# Altium schematic symbol library Connector.SchLib: 208 symbols (part 1 of 4)
Pins are listed as number, name and electrical type; pins without a type are passive.

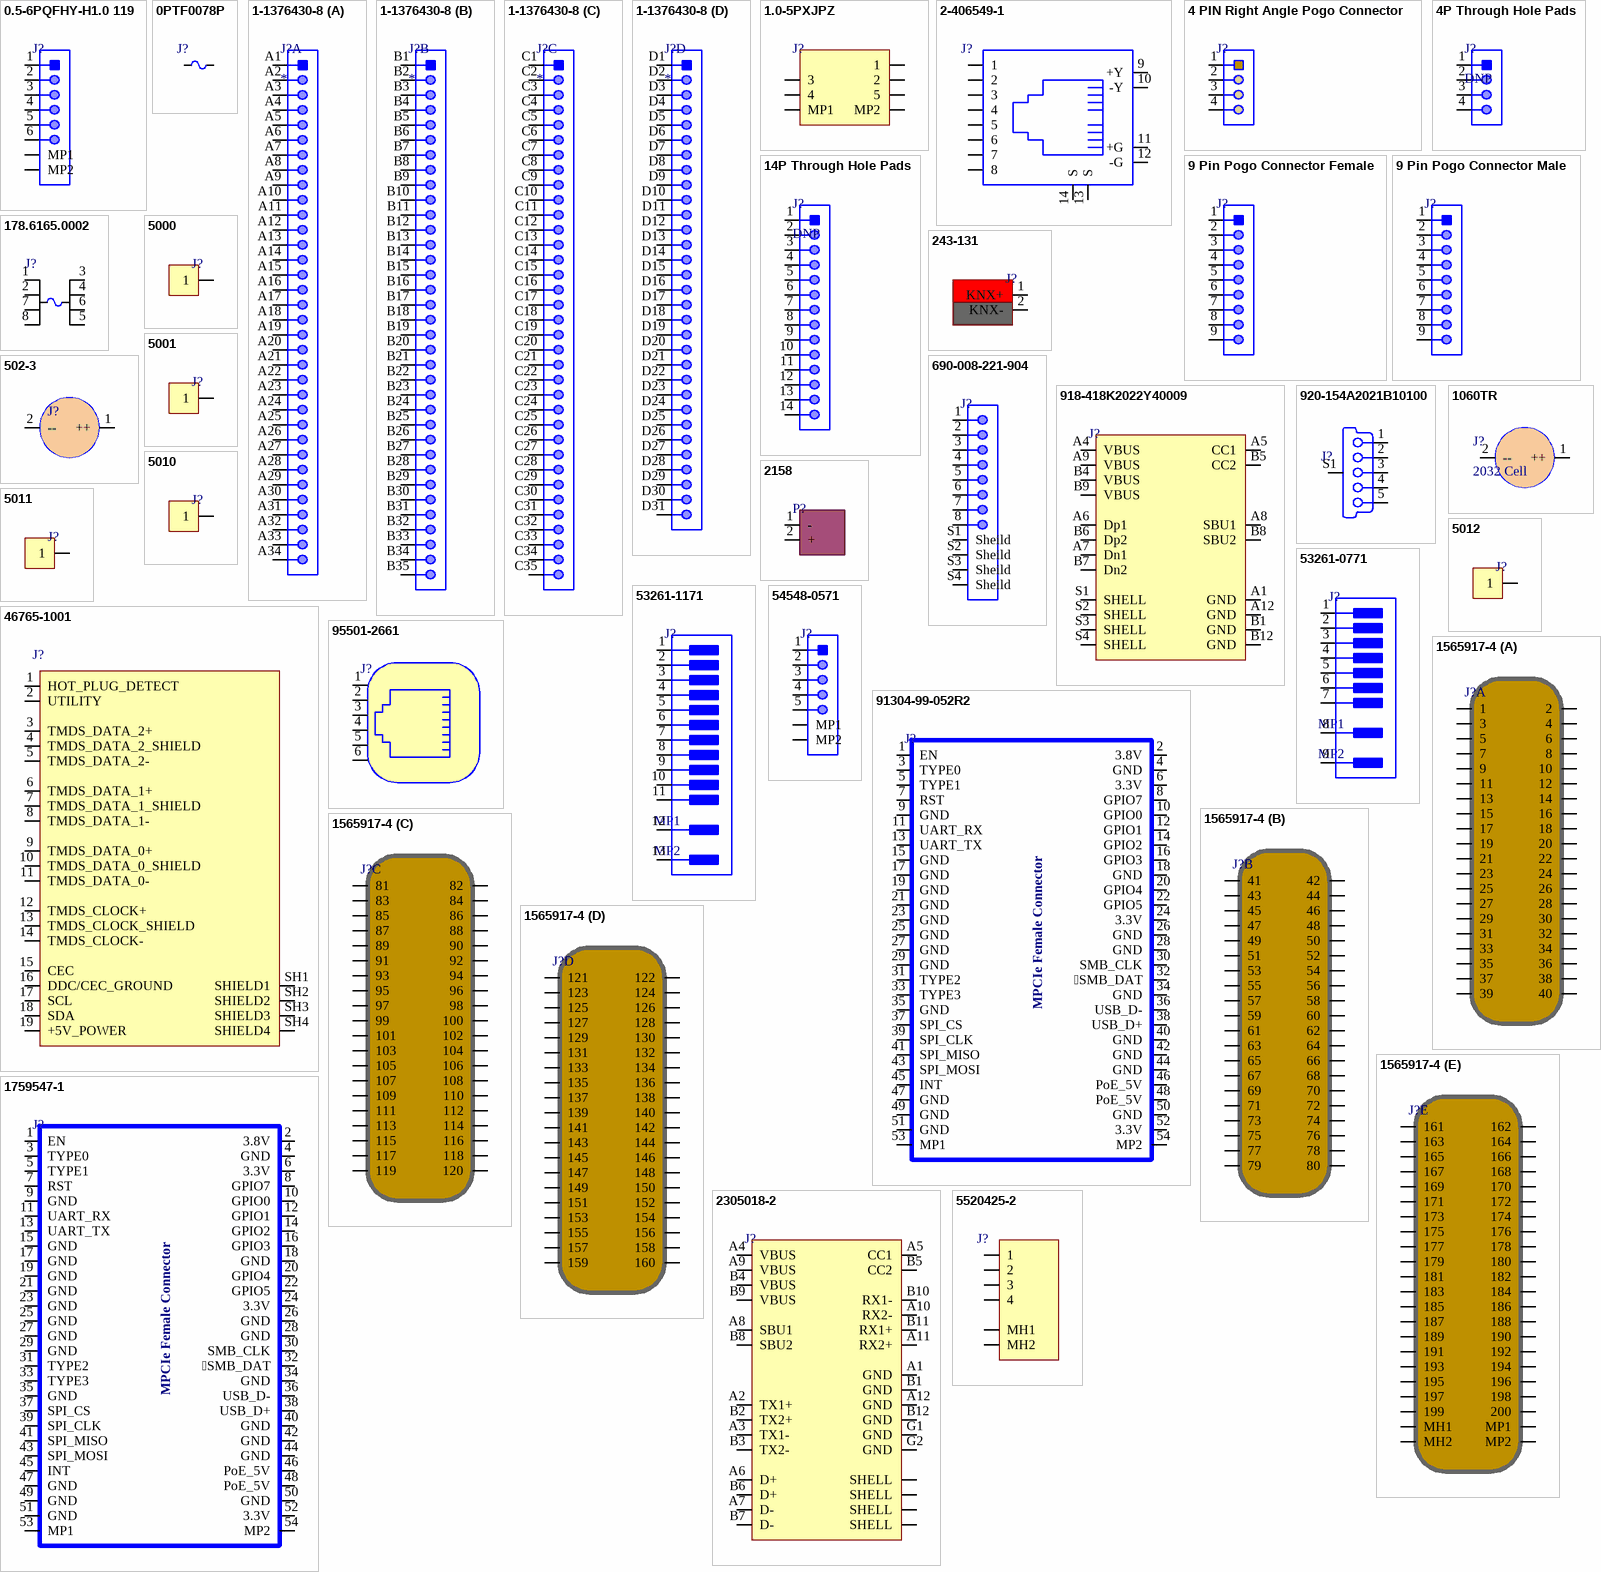
[diagram p0: symbols 0.5-6PQFHY-H1.0 119 to 5520425-2]

## 0.5-6PQFHY-H1.0 119
designator J?
Slide Lock -25℃~+85℃ 6 Double-sided contacts/up and down connection Surface Mount 0.5mm SMD,P=0.5mm FFC/FPC Connectors ROHS; Manufacturer: SHOU HAN; Manufacturer Part Number: 0.5-6PQFHY-H1.0 119; Package: SMD,P=0.5mm; LCSC Part Number: C2858296; Item Type: Connector; ComponentLink1Description: LCSC; ComponentLink1URL: https://www.lcsc.com/product-detail/FFC-span-style-background-color-ff0-FPC-span-Connectors_SHOU-HAN-0-5-6PQFHY-H1-0-119_C2858296.html
footprint 0.5-6PQFHY-H1.0 119
pins: 1, 2, 3, 4, 5, 6, MP1, MP2

## 0PTF0078P
designator J?
Fuse Holder 6.3A 250VDC/250VAC Through Hole Pin; Manufacturer: Littelfuse; Manufacturer Part Number: 0PTF0078P; Supplier: Future Electronics; Supplier Part Number: 9114913; RoHS: Yes; Category: Fuse Holders; Stock: 4000; Pricing: 2000=0.118, 6000=0.114, 10000=0.113, 20000=0.111, 40000=0.107 (USD); ComponentLink1URL: https://datasheet.ciiva.com/18456/ptf075-77-78-18456970.pdf?src-supplier=Digi-Key; ComponentLink1Description: https://datasheet.ciiva.com/18456/ptf075-77-78-18456970.pdf?src-supplier=Digi-Key; LCSC Part Number: C2760101; Item Type: Fuse Holder
footprint 0PTF0078P
pins: 1, 2

## 1-1376430-8
designator J?
025/040 135POS CAP ASSY H TIN; Manufacturer: TE Connectivity Raychem; Manufacturer Part Number: 1-1376430-8; Item Type: Connector; Supplier 1: Digikey; RoHS: Yes; Category: Connectors; Stock 1: 1632; Pricing 1: 1=11.55, 12=10.02667 (USD); Supplier Part Number 1: 17-1-1376430-8-ND
footprint 1-1376430-8
part A pins: A1, A2, A3, A4, A5, A6, A7, A8, A9, A10, A11, A12, A13, A14, A15, A16, A17, A18, A19, A20, A21, A22, A23, A24, A25, A26, A27, A28, A29, A30, A31, A32, A33, A34
part B pins: B1, B2, B3, B4, B5, B6, B7, B8, B9, B10, B11, B12, B13, B14, B15, B16, B17, B18, B19, B20, B21, B22, B23, B24, B25, B26, B27, B28, B29, B30, B31, B32, B33, B34, B35
part C pins: C1, C2, C3, C4, C5, C6, C7, C8, C9, C10, C11, C12, C13, C14, C15, C16, C17, C18, C19, C20, C21, C22, C23, C24, C25, C26, C27, C28, C29, C30, C31, C32, C33, C34, C35
part D pins: D1, D2, D3, D4, D5, D6, D7, D8, D9, D10, D11, D12, D13, D14, D15, D16, D17, D18, D19, D20, D21, D22, D23, D24, D25, D26, D27, D28, D29, D30, D31

## 1.0-5PXJPZ
designator J?
Slide Lock -25℃~+85℃ 5P Bottom Contact Surface Mount，Right Angle 1mm SMD,P=1mm,Surface Mount，Right Angle FFC/FPC Connectors ROHS; Manufacturer: BOOMELE(Boom Precision Elec); Manufacturer Part Number: 1.0-5PXJPZ; Package: SMD,P=1mm; LCSC Part Number: C31031; Item Type: FPC Connector; ComponentLink1Description: LCSC; ComponentLink1URL: https://www.lcsc.com/product-detail/FFC-FPC-Connectors_BOOMELE-Boom-Precision-Elec-1-0-5PXJPZ_C31031.html
footprint 1.0-5PXJPZ_
pins: 1, 2, 3, 4, 5, MP1, MP2

## 2-406549-1
designator J?
CONN MOD JACK 8P8C R/A SHIELDED; Manufacturer: TE Connectivity; Manufacturer Part Number: 2-406549-1; Item Type: Ethernet Connectors; Supplier: Future Electronics; LCSC Part Number: C125068; RoHS: Yes; Stock: 6608; Pricing: 1=2.16, 30=2.1, 100=2.04, 200=2, 500=1.9 (USD)
footprint 2-406549-1
pins: 1, 2, 3, 4, 5, 6, 7, 8, 9 +Y, 10 -Y, 11 +G, 12 -G, 13 S, 14 S

## 4 PIN Right Angle Pogo Connector
designator J?
4pin spring loaded right angle bended pogo pin connectorPopular; Manufacturer Part Number: 4 PIN Right Angle Pogo Connector; Item Type: Pogo Conector; Package: Custom; LCSC Part Number: *
footprint 4 PIN Right Angle Pogo Connector
pins: 1, 2, 3, 4

## 4P Through Hole Pads
designator J?, comment DNP
Wire Connecting Pads; Manufacturer Part Number: 4P Through Hole Pads; Item Type: Through Hole Pads
footprint 4P Through Hole Pads
pins: 1, 2, 3, 4

## 9 Pin Pogo Connector Female
designator J?
3A Magnetic Pogo Pin Connector 9 pin; Manufacturer: RTLECS; Manufacturer Part Number: MG0922F-RA; Package: Custom; ComponentLink1Description: ALiexpress; ComponentLink1URL: https://vi.aliexpress.com/item/1005002669709542.html
footprint MG0922F-RA
pins: 1, 2, 3, 4, 5, 6, 7, 8, 9

## 9 Pin Pogo Connector Male
designator J?
3A Magnetic Pogo Pin Connector 9 pin; Manufacturer: RTLECS; Manufacturer Part Number: MG0922M-RA; Package: Custom; ComponentLink1Description: ALiexpress; ComponentLink1URL: https://vi.aliexpress.com/item/1005002669709542.html
footprint MG0922M-RA
pins: 1, 2, 3, 4, 5, 6, 7, 8, 9

## 14P Through Hole Pads
designator J?, comment DNP
Wire Connecting Pads; Manufacturer Part Number: 14P Through Hole Pads; Item Type: Through Hole Pads
footprint 14P Through Hole Pads_
pins: 1, 2, 3, 4, 5, 6, 7, 8, 9, 10, 11, 12, 13, 14

## 178.6165.0002
designator J?
FUSE HOLDER BLADE 80V PCB; Manufacturer: Littelfuse Wickmann; Manufacturer Part Number: 178.6165.0002; Body Material: 4896ConductorMaterial; Current Rating: 30A; Supplier: Future Electronics; Supplier Part Number: 9883406; RoHS: Yes; Category: Fuse Holders; Stock: 3811; Pricing: 1=2.02, 40=1.96, 125=1.91, 400=1.86, 1250=1.77 (USD); Material: 4896ConductorMaterial; Width: 17.5mm; Thickness: 6mm; Lead Free: 5697LeadFree; ComponentLink1URL: https://datasheet.ciiva.com/295/littelfuse-ato-pcb-fuse-holders-178-6765-295568.pdf?src-supplier=Digikey; ComponentLink1Description: https://datasheet.ciiva.com/295/littelfuse-ato-pcb-fuse-holders-178-6765-295568.pdf?src-supplier=Digikey; ComponentLink2URL: https://datasheet.ciiva.com/4480/flrholder-58019-4480354.pdf?src-supplier=Mouser; ComponentLink2Description: https://datasheet.ciiva.com/4480/flrholder-58019-4480354.pdf?src-supplier=Mouser; ComponentLink3URL: https://datasheet.ciiva.com/16372/flrholder-16372408.pdf?src-supplier=Future+Electronics; ComponentLink3Description: https://datasheet.ciiva.com/16372/flrholder-16372408.pdf?src-supplier=Future+Electronics; ComponentLink4URL: https://datasheet.ciiva.com/15187/getdatasheetpartid-31610-15187861.pdf?src-supplier=Verical; ComponentLink4Description: https://datasheet.ciiva.com/15187/getdatasheetpartid-31610-15187861.pdf?src-supplier=Verical; LCSC Part Number: C207061; Item Type: Fuse Holder
footprint 178.6165.0002
pins: 1, 2, 3, 4, 5, 6, 7, 8

## 243-131
designator J?
THT PIN, SILVER-COLORED; Manufacturer: WAGO; Manufacturer Part Number: 243-131; Supplier: Digi-Key; Supplier Part Number: 2946-243-131-ND; RoHS: Yes; Category: Connectors; Pricing: 1000=0.04963 (USD); ComponentLink1URL: https://datasheet.ciiva.com/29213/729762-da-01-en-loetstift-243-131-1000-st-29213727.pdf?src-supplier=Conrad; ComponentLink1Description: https://datasheet.ciiva.com/29213/729762-da-01-en-loetstift-243-131-1000-st-29213727.pdf?src-supplier=Conrad
footprint 243-131
pins: 1 KNX+, 2 KNX-

## 502-3
designator J?
BATT HLDR COIN 16MM 1 CEL PC PIN; Manufacturer: Keystone Electronics; Manufacturer Part Number: 502-3; Item Type: Batteries and Accessories; Supplier: Digikey; Supplier Part Number: 36-5023-ND; RoHS: Yes; Stock: 31665; Pricing: 1=2.18, 25=1.8356, 100=1.5203, 250=1.39836, 500=1.3123, 1000=1.22624, 2500=1.1115, 5000=1.01828 (USD); ComponentLink1URL: https://datasheet.ciiva.com/4/502-3-4683.pdf?src-supplier=Digikey; ComponentLink1Description: https://datasheet.ciiva.com/4/502-3-4683.pdf?src-supplier=Digikey; ComponentLink2URL: https://datasheet.ciiva.com/16375/m60-2p2-16375499.pdf?src-supplier=Future+Electronics; ComponentLink2Description: https://datasheet.ciiva.com/16375/m60-2p2-16375499.pdf?src-supplier=Future+Electronics; LCSC Part Number: C238132
footprint 502-3
pins: 1 ++, 2 --

## 690-008-221-904
designator J?
Socket; USB A; THT; angled 90°; double; USB 2.0; gold-plated; Manufacturer Part Number: 690-008-221-904; Manufacturer: EDAC; Item Type: USB A Conncetor; ComponentLink1Description: Digikey; ComponentLink1URL: https://www.digikey.com/en/products/detail/edac-inc/690-008-221-013/1299805
footprint 690-008-221-904_
pins: 1, 2, 3, 4, 5, 6, 7, 8, S1 Sheild, S2 Sheild, S3 Sheild, S4 Sheild

## 918-418K2022Y40009
designator J?
USB 3.1 1 Brick nogging 16 Female Type-C SMD USB Connectors ROHS; Manufacturer: Jing Extension; Manufacturer Part Number: 918-418K2022Y40009; Item Type: USB C Connector; Package: Custom; LCSC Part Number: C2763102; ComponentLink1Description: LCSC; ComponentLink1URL: https://www.lcsc.com/product-detail/USB-Connectors_Jing-Extension-of-the-Electronic-Co-918-418K2022Y40009_C2763102.html
footprint 918-418K2022Y40009
pins: A1 GND (power), A4 VBUS (power), A5 CC1, A6 Dp1, A7 Dn1, A8 SBU1, A9 VBUS (power), A12 GND (power), B1 GND (power), B4 VBUS (power), B5 CC2, B6 Dp2, B7 Dn2, B8 SBU2, B9 VBUS (power), B12 GND (power), S1 SHELL, S2 SHELL, S3 SHELL, S4 SHELL

## 920-154A2021B10100
designator J?
1A USB 2.0 1 Board Edge, Straddle Mount 5P Female -30℃~+80℃ Micro-B - USB Connectors ROHS; Manufacturer: Jing Extension of the Electronic Co.; Manufacturer Part Number: 920-154A2021B10100; Item Type: Micro-B Connector; Package: Custom; LCSC Part Number: C69072; ComponentLink1Description: LCSC; ComponentLink1URL: https://www.lcsc.com/product-detail/USB-Connectors_Jing-Extension-of-the-Electronic-Co-920-154A2021B10100_C69072.html
footprint 920-154A2021B10100
pins: 1 V BUS (5V) "USB Vcc [Red]", 2 D- "USB Data - [White]", 3 D+ "USB Data + [Green]", 4 ID "Not Connected (or joined to pin 5 via resistor)", 5 GND "Ground [Black]", S1 Shield "Shell"

## 1060TR
designator J?, comment 2032 Cell
BATTERY HOLDER COIN 20MM SMD; Manufacturer: Keystone Electronics; Manufacturer Part Number: 1060; Body Material: Glass,Liquid Crystal Polymer; Number of Contacts: 2; Number of Batteries: 1; Approvals: UL; Item Type: Coin Cell Holder; ComponentLink1URL: https://www.distrelec.biz/Web/Downloads/02/32/06950232.pdf?mime=application%2Fpdf&src-supplier=Distrelec; ComponentLink1Description: https://www.distrelec.biz/Web/Downloads/02/32/06950232.pdf?mime=application%2Fpdf&src-supplier=Distrelec; ComponentLink2URL: http://www.farnell.com/datasheets/1769533.pdf?src-supplier=Element14; ComponentLink2Description: http://www.farnell.com/datasheets/1769533.pdf?src-supplier=Element14; ComponentLink3URL: http://www.keyelco.com/product-pdf.cfm?p=726&src-supplier=Digi-Key; ComponentLink3Description: http://www.keyelco.com/product-pdf.cfm?p=726&src-supplier=Digi-Key; ComponentLink4URL: http://www.mouser.com/ds/2/215/060-745916.pdf?src-supplier=Mouser; ComponentLink4Description: http://www.mouser.com/ds/2/215/060-745916.pdf?src-supplier=Mouser; ComponentLink5URL: http://www.rapidonline.com/pdf/18-3627.pdf?src-supplier=Rapid+Electronics; ComponentLink5Description: http://www.rapidonline.com/pdf/18-3627.pdf?src-supplier=Rapid+Electronics; ComponentLink6URL: http://uk.rs-online.com/webdocs/1152/0900766b811529cb.pdf?src-supplier=RSComponents; ComponentLink6Description: http://uk.rs-online.com/webdocs/1152/0900766b811529cb.pdf?src-supplier=RSComponents; ComponentLink7URL: http://www.keyelco.com/userAssets/file/M60-2p4.pdf?src-supplier=Future+Electronics; ComponentLink7Description: http://www.keyelco.com/userAssets/file/M60-2p4.pdf?src-supplier=Future+Electronics; Supplier 1: Digi-Key; Stock 1: 11504; Pricing 1: 1=1.53, 25=1.4208, 100=1.08, 250=0.95352, 500=0.88136, 1000=0.82388, 2500=0.74724, 5000=0.68976 (USD); Mount: Surface Mount,PCB; Color: White; Contact Material: Bronze,Gold; Material: Bronze; Min Operating Temperature: -50°C; Max Operating Temperature: 145°C; Packaging: Tray; Package Quantity: 1; Termination: SMD/SMT; Number of Cells: 1; Diameter: 20mm; Lead Free: Lead Free; REACH SVHC: No SVHC; Supplier Part Number 1: 36-1060-ND; LCSC Part Number: C238069
footprint 1060TR_
pins: 1 ++, 2 --

## 2158
designator P?
XT60 Connector Male-Female Pair, Black (Pololu); Manufacturer: Polulo; Manufacturer Part Number: 2158; Item Type: Power Connector; Package: Custom
footprint 2158.
pins: 1 -, 2 +

## 5000
designator J?
PC TEST POINT MINIATURE RED; Manufacturer: Keystone Electronics; Manufacturer Part Number: 5000; Item Type: Connector; Plating: Silver; Body Material: Bronze,PBT; Insulation: Insulated; Outside Diameter: 2.54mm; Inside Diameter: 1.27mm; Hole Diameter: 1.6mm; Supplier: Digikey; LCSC Part Number: C5199900; RoHS: Yes; Stock: 24415; Pricing: 1=0.38, 25=0.308, 100=0.3015, 250=0.28304, 500=0.2523, 1000=0.17746, 2500=0.16225, 5000=0.15211 (USD); Mounting Technology: PCB,Through Hole; Color: Red; Material: Nylon,Bronze,Silver; Contact Material: Bronze; Contact Plating: Tin,Silver; Series: THM; Packaging: Bulk; Package Quantity: 100; Length: 7.62mm; Height: 0.3inch; RoHS Compliant: Yes; Reach SVHC Compliant: No; Lead Free: Lead Free; Flammability Rating: UL94 V-0; ComponentLink1URL: https://datasheet.ciiva.com/11836/0900766b8009b7c7-11836046.pdf?src-supplier=Rs; ComponentLink1Description: https://datasheet.ciiva.com/11836/0900766b8009b7c7-11836046.pdf?src-supplier=Rs; ComponentLink2URL: https://datasheet.ciiva.com/16883/70182825-16883965.pdf?src-supplier=Allied+Electronics; ComponentLink2Description: https://datasheet.ciiva.com/16883/70182825-16883965.pdf?src-supplier=Allied+Electronics; ComponentLink3URL: https://datasheet.ciiva.com/2917/5000-5004-2917627.pdf?src-supplier=Digikey; ComponentLink3Description: https://datasheet.ciiva.com/2917/5000-5004-2917627.pdf?src-supplier=Digikey
footprint 5000
pins: 1

## 5001
designator J?
PC TEST POINT MINIATURE BLACK; Manufacturer: Keystone Electronics; Manufacturer Part Number: 5001; Item Type: Connector; Plating: Silver; Body Material: Bronze; Number of Ports: 1; Insulation: Insulated; Outside Diameter: 2.54mm; Hole Diameter: 1.6mm; Inside Diameter: 1.27mm; Supplier: Digikey; LCSC Part Number: C238122; RoHS: Yes; Stock: 323409; Pricing: 1=0.38, 25=0.308, 100=0.3015, 250=0.28304, 500=0.2523, 1000=0.17746, 2500=0.16225, 5000=0.15211 (USD); Mounting Technology: Through Hole; Contact Material: Bronze; Contact Plating: Tin,Silver; Color: Black; Housing Color: Black; Material: Nylon,Bronze,Silver; Insulation Material: Nylon; Packaging: Bulk; Termination: Through Hole; Series: THM; Package Quantity: 100; Number of Contacts: 1; Orientation: Straight; Diameter: 2.54mm; Length: 7.62mm; Reach SVHC Compliant: No; RoHS Compliant: Yes; Lead Free: Lead Free; ComponentLink1URL: https://datasheet.ciiva.com/11836/0900766b8009b7c7-11836045.pdf?src-supplier=Rs; ComponentLink1Description: https://datasheet.ciiva.com/11836/0900766b8009b7c7-11836045.pdf?src-supplier=Rs; ComponentLink2URL: https://datasheet.ciiva.com/27052/1581986-27052611.pdf?src-supplier=Jameco; ComponentLink2Description: https://datasheet.ciiva.com/27052/1581986-27052611.pdf?src-supplier=Jameco; ComponentLink3URL: https://datasheet.ciiva.com/22631/1703983-22631100.pdf?src-supplier=Element14; ComponentLink3Description: https://datasheet.ciiva.com/22631/1703983-22631100.pdf?src-supplier=Element14; ComponentLink4URL: https://datasheet.ciiva.com/16318/m60-2p60-16318423.pdf?src-supplier=Future+Electronics; ComponentLink4Description: https://datasheet.ciiva.com/16318/m60-2p60-16318423.pdf?src-supplier=Future+Electronics
footprint 5001
pins: 1

## 5010
designator J?
PC TEST POINT MULTIPURPOSE RED; Manufacturer: Keystone Electronics; Manufacturer Part Number: 5010; Item Type: Connectors; Supplier: Digikey; LCSC Part Number: C2906765; RoHS: Yes; Stock: 128327; Pricing: 1=0.38, 25=0.308, 100=0.3015, 250=0.28304, 500=0.2523, 1000=0.17746, 2500=0.16225, 5000=0.15211 (USD); ComponentLink1URL: https://datasheet.ciiva.com/11744/0900766b8009b7c7-11744920.pdf?src-supplier=Rs; ComponentLink1Description: https://datasheet.ciiva.com/11744/0900766b8009b7c7-11744920.pdf?src-supplier=Rs; ComponentLink2URL: https://datasheet.ciiva.com/16506/m60-2p60-16506972.pdf?src-supplier=Future+Electronics; ComponentLink2Description: https://datasheet.ciiva.com/16506/m60-2p60-16506972.pdf?src-supplier=Future+Electronics; ComponentLink3URL: https://datasheet.ciiva.com/22631/1703983-22631113.pdf?src-supplier=Element14; ComponentLink3Description: https://datasheet.ciiva.com/22631/1703983-22631113.pdf?src-supplier=Element14; ComponentLink4URL: https://datasheet.ciiva.com/16883/70182825-16883886.pdf?src-supplier=Allied+Electronics; ComponentLink4Description: https://datasheet.ciiva.com/16883/70182825-16883886.pdf?src-supplier=Allied+Electronics; ComponentLink5URL: https://datasheet.ciiva.com/2917/5010-2917626.pdf?src-supplier=Digikey; ComponentLink5Description: https://datasheet.ciiva.com/2917/5010-2917626.pdf?src-supplier=Digikey; ComponentLink6URL: https://datasheet.ciiva.com/1454/1703983-1454833.pdf?src-supplier=Element14; ComponentLink6Description: https://datasheet.ciiva.com/1454/1703983-1454833.pdf?src-supplier=Element14
footprint 5010
pins: 1

## 5011
designator J?
PC TEST POINT MULTIPURPOSE BLACK; Manufacturer: Keystone Electronics; Manufacturer Part Number: 5011; Item Type: Connectors; Gender: 30Gender; Inside Diameter: 1.78mm; Supplier: Digikey; LCSC Part Number: C238127; RoHS: Yes; Stock: 243196; Pricing: 1=0.38, 25=0.308, 100=0.3015, 250=0.28304, 500=0.2523, 1000=0.17746, 2500=0.16225, 5000=0.15211 (USD); Length: 11.3mm; Lead Free: 5697LeadFree; ComponentLink1URL: https://datasheet.ciiva.com/11744/0900766b8009b7c7-11744935.pdf?src-supplier=Rs; ComponentLink1Description: https://datasheet.ciiva.com/11744/0900766b8009b7c7-11744935.pdf?src-supplier=Rs; ComponentLink2URL: https://datasheet.ciiva.com/1454/1718230-1454834.pdf?src-supplier=Element14; ComponentLink2Description: https://datasheet.ciiva.com/1454/1718230-1454834.pdf?src-supplier=Element14; ComponentLink3URL: https://datasheet.ciiva.com/46412/1703983-46412138.pdf?src-supplier=Element14; ComponentLink3Description: https://datasheet.ciiva.com/46412/1703983-46412138.pdf?src-supplier=Element14; ComponentLink4URL: https://datasheet.ciiva.com/16351/m60-2p60-16351093.pdf?src-supplier=Future+Electronics; ComponentLink4Description: https://datasheet.ciiva.com/16351/m60-2p60-16351093.pdf?src-supplier=Future+Electronics; ComponentLink5URL: https://datasheet.ciiva.com/2917/5011-2917635.pdf?src-supplier=Digikey; ComponentLink5Description: https://datasheet.ciiva.com/2917/5011-2917635.pdf?src-supplier=Digikey
footprint 5011
pins: 1

## 5012
designator J?
PC TEST POINT MULTIPURPOSE WHITE; Manufacturer: Keystone Electronics; Manufacturer Part Number: 5012; Item Type: Connectors; Supplier: Digikey; LCSC Part Number: C2906766; RoHS: Yes; Stock: 102631; Pricing: 1=0.38, 25=0.308, 100=0.3015, 250=0.28304, 500=0.2523, 1000=0.17746, 2500=0.16225, 5000=0.15211 (USD); ComponentLink1URL: https://datasheet.ciiva.com/27052/1582065-27052612.pdf?src-supplier=Jameco; ComponentLink1Description: https://datasheet.ciiva.com/27052/1582065-27052612.pdf?src-supplier=Jameco; ComponentLink2URL: https://datasheet.ciiva.com/16200/m60-2p60-16200039.pdf?src-supplier=Future+Electronics; ComponentLink2Description: https://datasheet.ciiva.com/16200/m60-2p60-16200039.pdf?src-supplier=Future+Electronics; ComponentLink3URL: https://datasheet.ciiva.com/22631/1703983-22631115.pdf?src-supplier=Element14; ComponentLink3Description: https://datasheet.ciiva.com/22631/1703983-22631115.pdf?src-supplier=Element14; ComponentLink4URL: https://datasheet.ciiva.com/16884/70182825-16884150.pdf?src-supplier=Allied+Electronics; ComponentLink4Description: https://datasheet.ciiva.com/16884/70182825-16884150.pdf?src-supplier=Allied+Electronics; ComponentLink5URL: https://datasheet.ciiva.com/2917/5012-2917634.pdf?src-supplier=Digikey; ComponentLink5Description: https://datasheet.ciiva.com/2917/5012-2917634.pdf?src-supplier=Digikey; ComponentLink6URL: https://datasheet.ciiva.com/1454/1703983-1454835.pdf?src-supplier=Element14; ComponentLink6Description: https://datasheet.ciiva.com/1454/1703983-1454835.pdf?src-supplier=Element14
footprint 5012
pins: 1

## 46765-1001
designator J?
CONN RCP MICRO HDMI 19POS SMD RA; Manufacturer: Molex; Manufacturer Part Number: 46765-1001; Body Material: Plastic,Metal; Gender: Receptacle; Voltage Rating: 30V; Max Current Rating: 800mA; Number of Positions: 19; Number of Ports: 1; Pitch: 0.4mm; Item Type: Connector; Supplier: Mouser; Supplier Part Number: 538-46765-1001; RoHS: Yes; Category: Audio / Video Connectors; Stock: 3188; Pricing: 1=2.54, 10=2.23, 50=2.23, 100=1.95, 1000=1.62, 10000=1.49 (USD); Mounting Technology: Surface Mount,Horizontal; Case/Package: Metal; Contact Plating: Gold; Contact Material: Copper Alloy,Copper; Housing Material: Polymer; Weight: 0.0109oz; Min Operating Temperature: -30°C; Max Operating Temperature: 85°C; Packaging: Tape and Reel; Series: 46765; Package Quantity: 1000; Current Rating: 800mA; Connector Type: HDMI; Termination: Solder; Number of Contacts: 19; Orientation: Right Angle; Length: 6.5mm; Width: 7mm; Depth: 7.5mm; RoHS Compliant: Yes; Flammability Rating: UL94 V-0; Reach SVHC Compliant: Unknown; LCSC Part Number: C563878
footprint 46765-1001
pins: 1 HOT_PLUG_DETECT, 2 UTILITY, 3 TMDS_DATA_2+, 4 TMDS_DATA_2_SHIELD, 5 TMDS_DATA_2-, 6 TMDS_DATA_1+, 7 TMDS_DATA_1_SHIELD, 8 TMDS_DATA_1-, 9 TMDS_DATA_0+, 10 TMDS_DATA_0_SHIELD, 11 TMDS_DATA_0-, 12 TMDS_CLOCK+, 13 TMDS_CLOCK_SHIELD, 14 TMDS_CLOCK-, 15 CEC, 16 DDC/CEC_GROUND, 17 SCL, 18 SDA, 19 +5V_POWER, SH1 SHIELD1, SH2 SHIELD2, SH3 SHIELD3, SH4 SHIELD4

## 53261-0771
designator J?
CONN HEADER SMD R/A 7POS 1.25MM; Manufacturer: Molex; Manufacturer Part Number: 53261-0771; Body Plating: Tin; Contact Resistance: 20mR; Number of Contacts: 7; Current Rating: 1A; Voltage Rating: 125V; Insulation Resistance: 100MR; Item Type: Wire To Wire Connector; Supplier 1: Mouser; RoHS: Yes; Category: Headers and Wire Housings; Stock 1: 27199; Pricing 1: 1=0.83, 10=0.688, 50=0.688, 100=0.574, 1000=0.504, 10000=0.419 (USD); Mounting Technology: Surface Mount; Color: Natural; Contact Plating: Tin; Contact Material: Bronze,Brass,Tin; Housing Color: Natural; Housing Material: Nylon; Min Operating Temperature: -40°C; Max Operating Temperature: 85°C; Packaging: Tape and Reel; Termination: Solder; Orientation: Right Angle; Series: PicoBlade; Number of Rows: 1; Number of Positions: 7; Contact Type: Blade Pin; Contact Gender: Male; Voltage Rating (AC): 125V; Working Voltage: 125V; Length: 13.9mm; Pitch: 1.25mm; Lead Pitch: 1.25mm; Depth: 5.2mm; RoHS Compliant: Yes; Flammability Rating: UL94 V-0; Reach SVHC Compliant: Unknown; ComponentLink1URL: https://datasheet.ciiva.com/392/532610371-sd-392113.pdf?src-supplier=Digi-Key; ComponentLink1Description: https://datasheet.ciiva.com/392/532610371-sd-392113.pdf?src-supplier=Digi-Key; ComponentLink2URL: https://datasheet.ciiva.com/11747/0900766b8078fc7d-11747893.pdf?src-supplier=Rs; ComponentLink2Description: https://datasheet.ciiva.com/11747/0900766b8078fc7d-11747893.pdf?src-supplier=Rs; ComponentLink3URL: https://datasheet.ciiva.com/392/532610771-sd-392145.pdf?src-supplier=Digi-Key; ComponentLink3Description: https://datasheet.ciiva.com/392/532610771-sd-392145.pdf?src-supplier=Digi-Key; ComponentLink4URL: https://datasheet.ciiva.com/392/532610771-sd-392146.pdf?src-supplier=Digi-Key; ComponentLink4Description: https://datasheet.ciiva.com/392/532610771-sd-392146.pdf?src-supplier=Digi-Key; Supplier Part Number 1: 538-53261-0771; LCSC Part Number: C505276
footprint 53261-0771
pins: 1, 2, 3, 4, 5, 6, 7, 8 MP1, 9 MP2

## 53261-1171
designator J?
CONN HEADER SMD R/A 11POS 1.25MM; Manufacturer: Molex; Manufacturer Part Number: 53261-1171; Number of Contacts: 11; Current Rating: 1A; Voltage Rating: 125V; Insulation Resistance: 100MR; Gender: Male; Glow Wire Compliant: Non-compliant; Item Type: Wire To Board Connector; Supplier 1: Mouser; RoHS: Yes; Category: Headers and Wire Housings; Stock 1: 3128; Pricing 1: 1=1.24, 10=1.01, 50=1.01, 100=0.852, 1000=0.662, 10000=0.572 (USD); Contact Plating: Tin; Contact Material: Bronze,Brass,Tin; Housing Material: Thermoplastic; Color: Natural; Number of Rows: 1; Termination: SMD/SMT; Packaging: Tape and Reel; Orientation: Right Angle; Contact Gender: Male; Number of Positions: 11; Number of Circuits: 11; Voltage Rating (DC): 125V; Series: PicoBlade; Height: 3.4mm; Pitch: 1.25mm; Lead Pitch: 1.25mm; Lead Free: Lead Free; Flammability Rating: UL94 V-0; RoHS Compliant: Yes; Reach SVHC Compliant: Unknown; ComponentLink1URL: https://datasheet.ciiva.com/5158/0532611171-pcb-headers-170916-5158048.pdf?src-supplier=Mouser; ComponentLink1Description: https://datasheet.ciiva.com/5158/0532611171-pcb-headers-170916-5158048.pdf?src-supplier=Mouser; ComponentLink2URL: https://datasheet.ciiva.com/16657/0532611171-pcb-headers-16657840.pdf?; ComponentLink2Description: https://datasheet.ciiva.com/16657/0532611171-pcb-headers-16657840.pdf?; Supplier Part Number 1: 538-53261-1171; LCSC Part Number: C585957
footprint 53261-1171
pins: 1, 2, 3, 4, 5, 6, 7, 8, 9, 10, 11, 12 MP1, 13 MP2

## 54548-0571
designator J?
0.5 FPC ZIF HSG ASSY 5CKT EMBSTP; Manufacturer: Molex; Manufacturer Part Number: 54548-0571; Number of Contacts: 5; Voltage Rating: 50V; Current Rating: 500mA; Gender: Female; Stackable: No; Pitch: 0.5mm; Item Type: FPC Connector; Supplier 1: Mouser; RoHS: Yes; Category: FFC / FPC; Stock 1: 15599; Pricing 1: 1=1.26000, 10=1.04000, 50=1.04000, 100=0.86300, 1000=0.69000, 10000=0.58700 (USD); Contact Material: Bronze; Contact Plating: Gold; Material: Bronze; Housing Material: Thermoplastic; Number of Rows: 1; Termination: SMD/SMT; Orientation: Right Angle; Package Quantity: 3000; Packaging: Tape and Reel; Number of Positions: 5; Number of Circuits: 5; Series: 54548; Radiation Hardening: No; Reach SVHC Compliant: Yes; ELV: Compliant; RoHS Compliant: Yes; ComponentLink1URL: https://datasheet.ciiva.com/5137/0545480571-ffc-fpc-connectors-228778-5137871.pdf?src-supplier=Mouser; ComponentLink1Description: https://datasheet.ciiva.com/5137/0545480571-ffc-fpc-connectors-228778-5137871.pdf?src-supplier=Mouser; Supplier Part Number 1: 538-54548-0571
footprint 54548-0571
pins: 1, 2, 3, 4, 5, MP1, MP2

## 91304-99-052R2
designator J?
0.8mm mPCI-E Surface Mount 52 SMD,P=0.8mm Card Edge Connectors ROHS; Manufacturer: UMAX; Manufacturer Part Number: 91304-99-052R2; Item Type: mPCI-E Connector; ComponentLink1Description: LCSC; ComponentLink1URL: https://www.lcsc.com/product-detail/Card-Edge-Connectors_UMAX-91304-99-052R2_C404126.html; Package: SMD,P=0.8mm; LCSC Part Number: C404126
footprint 91304-99-052R2
pins: 1 EN, 2 3.8V, 3 TYPE0, 4 GND, 5 TYPE1, 6 3.3V, 7 RST, 8 GPIO7, 9 GND, 10 GPIO0, 11 UART_RX, 12 GPIO1, 13 UART_TX, 14 GPIO2, 15 GND, 16 GPIO3, 17 GND, 18 GND, 19 GND, 20 GPIO4, 21 GND, 22 GPIO5, 23 GND, 24 3.3V, 25 GND, 26 GND, 27 GND, 28 GND, 29 GND, 30 SMB_CLK, 31 TYPE2, 32 SMB_DAT, 33 TYPE3, 34 GND, 35 GND, 36 USB_D-, 37 SPI_CS, 38 USB_D+, 39 SPI_CLK, 40 GND, 41 SPI_MISO, 42 GND, 43 SPI_MOSI, 44 GND, 45 INT, 46 PoE_5V, 47 GND, 48 PoE_5V, 49 GND, 50 GND, 51 GND, 52 3.3V, 53 MP1, 54 MP2
text: MPCIe Female Connector

## 95501-2661
designator J?
CONN MOD JACK 6P6C R/A UNSHLD; Manufacturer: Molex; Manufacturer Part Number: 95501-2661; Item Type: RJ12 Connector; Plating: 154ConductorMaterial; Voltage Rating: 125V; Supplier: Mouser; LCSC Part Number: C240856; RoHS: Yes; Stock: 3340; Pricing: 1=0.9, 10=0.656, 50=0.656, 100=0.577, 1000=0.577, 10000=0.576 (USD); ComponentLink1URL: https://datasheet.ciiva.com/11726/0900766b801680eb-11726054.pdf?src-supplier=Rs; ComponentLink1Description: https://datasheet.ciiva.com/11726/0900766b801680eb-11726054.pdf?src-supplier=Rs; ComponentLink2URL: https://datasheet.ciiva.com/23653/10889-23653499.pdf?src-supplier=Newark; ComponentLink2Description: https://datasheet.ciiva.com/23653/10889-23653499.pdf?src-supplier=Newark; ComponentLink3URL: https://datasheet.ciiva.com/4562/0955012661-modular-jacks-plug-177638-4562407.pdf?src-supplier=Mouser; ComponentLink3Description: https://datasheet.ciiva.com/4562/0955012661-modular-jacks-plug-177638-4562407.pdf?src-supplier=Mouser; ComponentLink4URL: https://datasheet.ciiva.com/30251/65060955012661-modular-jacks-plug-30251660.pdf?src-supplier=Onlinecomponents.com; ComponentLink4Description: https://datasheet.ciiva.com/30251/65060955012661-modular-jacks-plug-30251660.pdf?src-supplier=Onlinecomponents.com; ComponentLink5URL: https://datasheet.ciiva.com/16075/360890955012661-modular-jacks-plug-16075547.pdf?src-supplier=Onlinecomponents.com; ComponentLink5Description: https://datasheet.ciiva.com/16075/360890955012661-modular-jacks-plug-16075547.pdf?src-supplier=Onlinecomponents.com; ComponentLink6URL: https://datasheet.ciiva.com/1108/1597654-1108695.pdf?src-supplier=Element14; ComponentLink6Description: https://datasheet.ciiva.com/1108/1597654-1108695.pdf?src-supplier=Element14
footprint 955012661
pins: 1, 2, 3, 4, 5, 6

## 1565917-4
designator J?
CONN SKT SODIMM 200POS R/A SMD; Manufacturer: TE Connectivity; Manufacturer Part Number: 1565917-4; Number of Contacts: 200; Memory Type: DDR2 SDRAM; PCB Mount Retention: With; Voltage Rating: 1.8V; Contact Current Rating: 500mA; Circuit Application: Power; Connector System: Cable-to-Board; Sealable: No (Without); Connector Type: Socket; Pitch: 0.6mm; Row Spacing: 0.244inch; Stack Height: 5.2mm; Item Type: SODIMM Connector; Supplier 1: Digi-Key; RoHS: Yes; Category: Memory Connectors; Stock 1: 14675; Pricing 1: 1=6.10000, 10=5.84400, 25=5.33600, 50=5.08180 (USD); Mount: Surface Mount; Number of Pins: 200; Housing Color: Black; Insulation Material: Thermoplastic; Housing Material: Thermoplastic; Contact Material: Copper Alloy; Contact Plating: Gold; Min Operating Temperature: -67°C; Max Operating Temperature: 185°C; Termination: Solder; Number of Rows: 2; Orientation: Right Angle; Number of Positions: 200; Packaging: Tape and Reel; Package Quantity: 150; Radiation Hardening: No; ELV: Compliant; Flammability Rating: UL94 V-0; REACH SVHC: Unknown; Lead Free: Lead Free; ComponentLink1URL: https://datasheet.ciiva.com/1106/1605472-1106736.pdf?src-supplier=Newark; ComponentLink1Description: https://datasheet.ciiva.com/1106/1605472-1106736.pdf?src-supplier=Newark; ComponentLink2URL: https://datasheet.ciiva.com/682/eng-cd-1565917-d2-682628.pdf?src-supplier=Digi-Key; ComponentLink2Description: https://datasheet.ciiva.com/682/eng-cd-1565917-d2-682628.pdf?src-supplier=Digi-Key; ComponentLink3URL: https://datasheet.ciiva.com/16314/1565917-4-16314005.pdf?src-supplier=Future+Electronics; ComponentLink3Description: https://datasheet.ciiva.com/16314/1565917-4-16314005.pdf?src-supplier=Future+Electronics; ComponentLink4URL: https://datasheet.ciiva.com/30082/a15659174317-30082398.pdf?src-supplier=Onlinecomponents.com; ComponentLink4Description: https://datasheet.ciiva.com/30082/a15659174317-30082398.pdf?src-supplier=Onlinecomponents.com; Supplier Part Number 1: A97498CT-ND
footprint 1565917-4_
part A pins: 1, 2, 3, 4, 5, 6, 7, 8, 9, 10, 11, 12, 13, 14, 15, 16, 17, 18, 19, 20, 21, 22, 23, 24, 25, 26, 27, 28, 29, 30, 31, 32, 33, 34, 35, 36, 37, 38, 39, 40
part B pins: 41, 42, 43, 44, 45, 46, 47, 48, 49, 50, 51, 52, 53, 54, 55, 56, 57, 58, 59, 60, 61, 62, 63, 64, 65, 66, 67, 68, 69, 70, 71, 72, 73, 74, 75, 76, 77, 78, 79, 80
part C pins: 81, 82, 83, 84, 85, 86, 87, 88, 89, 90, 91, 92, 93, 94, 95, 96, 97, 98, 99, 100, 101, 102, 103, 104, 105, 106, 107, 108, 109, 110, 111, 112, 113, 114, 115, 116, 117, 118, 119, 120
part D pins: 121, 122, 123, 124, 125, 126, 127, 128, 129, 130, 131, 132, 133, 134, 135, 136, 137, 138, 139, 140, 141, 142, 143, 144, 145, 146, 147, 148, 149, 150, 151, 152, 153, 154, 155, 156, 157, 158, 159, 160
part E pins: 161, 162, 163, 164, 165, 166, 167, 168, 169, 170, 171, 172, 173, 174, 175, 176, 177, 178, 179, 180, 181, 182, 183, 184, 185, 186, 187, 188, 189, 190, 191, 192, 193, 194, 195, 196, 197, 198, 199, 200, MH1, MH2, MP1, MP2

## 1759547-1
designator J?
CONN PCI EXP MIN FML 52POS 0.031; Manufacturer: TE Connectivity; Manufacturer Part Number: 1759547-1; Number of Positions: 52; Gender: Female; Pitch: 0.8mm; Item Type: Card Edge Connector; Supplier 1: Rs; RoHS: Yes; Category: Card Edge Connectors; Stock 1: 4385; Pricing 1: 5=1.254, 50=1.156, 125=1.044, 250=0.956 (GBP); Mounting Technology: Surface Mount; Contact Plating: Gold,Tin,Matte; Contact Material: Bronze; Housing Color: Black; Housing Material: Polymer; Color: Black; Insulation Material: Polymer; Number of Rows: 2; Package Quantity: 450; Packaging: Cut Tape; Number of Contacts: 52; Termination: Solder; Orientation: Right Angle; Series: -; Contact Type: -; Lead Free: Lead Free; RoHS Compliant: Yes; ComponentLink1URL: http://www.farnell.com/datasheets/2645681.pdf?src-supplier=Farnell; ComponentLink1Description: http://www.farnell.com/datasheets/2645681.pdf?src-supplier=Farnell; ComponentLink2URL: http://www.farnell.com/datasheets/2645681.pdf?src-supplier=Newark; ComponentLink2Description: http://www.farnell.com/datasheets/2645681.pdf?src-supplier=Newark; ComponentLink3URL: http://www.te.com/usa-en/product-1759547-1.html?src-supplier=Avnet; ComponentLink3Description: http://www.te.com/usa-en/product-1759547-1.html?src-supplier=Avnet; Supplier Part Number 1: 2175401; LCSC Part Number: C428485
footprint 1759547-1
pins: 1 EN, 2 3.8V, 3 TYPE0, 4 GND, 5 TYPE1, 6 3.3V, 7 RST, 8 GPIO7, 9 GND, 10 GPIO0, 11 UART_RX, 12 GPIO1, 13 UART_TX, 14 GPIO2, 15 GND, 16 GPIO3, 17 GND, 18 GND, 19 GND, 20 GPIO4, 21 GND, 22 GPIO5, 23 GND, 24 3.3V, 25 GND, 26 GND, 27 GND, 28 GND, 29 GND, 30 SMB_CLK, 31 TYPE2, 32 SMB_DAT, 33 TYPE3, 34 GND, 35 GND, 36 USB_D-, 37 SPI_CS, 38 USB_D+, 39 SPI_CLK, 40 GND, 41 SPI_MISO, 42 GND, 43 SPI_MOSI, 44 GND, 45 INT, 46 PoE_5V, 47 GND, 48 PoE_5V, 49 GND, 50 GND, 51 GND, 52 3.3V, 53 MP1, 54 MP2
text: MPCIe Female Connector

## 2305018-2
designator J?
CONN RCP USB3.1 TYPEC 24P SMD RA; Manufacturer: TE Connectivity AMP; Manufacturer Part Number: 2305018-2; Connector Type: USB; Number of Contacts: 24; Gender: Receptacle; Number of Ports: 1; Current Rating: 1.25A; Voltage Rating: 30V; Shielding: Shielded; Ratings: Waterproof; Item Type: USB C Connector; Supplier 1: Digi-Key; RoHS: Yes; Category: USB Connectors; Stock 1: 4590; Pricing 1: 1=3.00000, 10=2.87800, 25=2.63840, 50=2.51840, 100=2.39840, 250=2.09864 (USD); Mount: Surface Mount,Through Hole; Contact Plating: Gold; Insulation Color: Black; Min Operating Temperature: -40°C; Max Operating Temperature: 85°C; Packaging: Tape and Reel; Termination: Solder; Flammability Rating: UL94 V-0; RoHS Compliant: Yes; ComponentLink1URL: http://www.farnell.com/datasheets/2611889.pdf?src-supplier=Farnell; ComponentLink1Description: http://www.farnell.com/datasheets/2611889.pdf?src-supplier=Farnell; ComponentLink2URL: https://www.te.com/commerce/DocumentDelivery/DDEController?Action=srchrtrv&DocNm=2305018&DocType=Customer+Drawing&DocLang=English&src-supplier=Digi-Key; ComponentLink2Description: https://www.te.com/commerce/DocumentDelivery/DDEController?Action=srchrtrv&DocNm=2305018&DocType=Customer+Drawing&DocLang=English&src-supplier=Digi-Key; ComponentLink3URL: http://www.farnell.com/datasheets/2611889.pdf?src-supplier=Newark; ComponentLink3Description: http://www.farnell.com/datasheets/2611889.pdf?src-supplier=Newark; Supplier Part Number 1: A132569CT-ND; LCSC Part Number: C498674
footprint 2305018-2_
pins: A1 GND (power), A2 TX1+, A3 TX1-, A4 VBUS (power), A5 CC1, A6 D+, A7 D-, A8 SBU1, A9 VBUS (power), A10 RX2-, A11 RX2+, A12 GND (power), B1 GND (power), B2 TX2+, B3 TX2-, B4 VBUS (power), B5 CC2, B6 D+, B7 D-, B8 SBU2, B9 VBUS (power), B10 RX1-, B11 RX1+, B12 GND (power), G1 GND (power), G2 GND (power), S1 SHELL, S2 SHELL, S3 SHELL, S4 SHELL

## 5520425-2
designator J?
CONN MOD JACK 6P4C VERT UNSHLD; Manufacturer: TE Connectivity; Manufacturer Part Number: 5520425-2; Number of Terminals/Pins: 4; Number of Contacts: 6; Keyed: No; Element Configuration: Single; Number of Ports: 1; Gender: Female; Shielding: Unshielded; Max Voltage Rating (AC): 150V; Direction: User Selectable; PCB Mounting Orientation: Vertical; Current Rating: 1.5A; Contact Resistance: 30mR; Pitch: 2.54mm; Tail Length: 3.18mm; PCB Thickness: 1.57mm; Plating Thickness: 1.27um; Approvals: UL,CSA; Item Type: Ethernet Connector; Supplier 1: Digi-Key; RoHS: Yes; Category: Modular / Ethernet Connectors; Stock 1: 1404; Pricing 1: 1=1.77000, 10=1.60700, 25=1.50880, 40=1.44325, 176=1.37773, 352=1.24651, 528=1.14811, 1056=0.98408, 2464=0.91848 (USD); Contact Material: Bronze; Contact Plating: Gold; Housing Color: Black; Housing Material: PBT; Min Operating Temperature: -40°C; Max Operating Temperature: 70°C; Termination: Solder; Orientation: Straight; Connector Type: Jack; Number of Positions: 6; Number of Positions Loaded: 4; Package Quantity: 2816; Number of Rows: 1; Voltage Rating: 150V; Contact Gender: Female; Packaging: Tray; Length: 13.59mm; Width: 16.51mm; Depth: 16.01mm; Radiation Hardening: No; Flammability Rating: UL94 V-0; REACH SVHC: Unknown; ComponentLink1URL: https://datasheet.ciiva.com/30494/0900766b8121ec00-30494433.pdf?src-supplier=RSComponents; ComponentLink1Description: https://datasheet.ciiva.com/30494/0900766b8121ec00-30494433.pdf?src-supplier=RSComponents; ComponentLink2URL: https://datasheet.ciiva.com/685/eng-cd-5520425-d1-685288.pdf?src-supplier=Digi-Key; ComponentLink2Description: https://datasheet.ciiva.com/685/eng-cd-5520425-d1-685288.pdf?src-supplier=Digi-Key; ComponentLink3URL: https://datasheet.ciiva.com/19476/956272-19476731.pdf?src-supplier=Jameco; ComponentLink3Description: https://datasheet.ciiva.com/19476/956272-19476731.pdf?src-supplier=Jameco; ComponentLink4URL: https://datasheet.ciiva.com/30082/eng-cs-82066-mod-jacks-and-mrj21-prod-single-1107-30082071.pdf?src-supplier=Onlinecomponents.com; ComponentLink4Description: https://datasheet.ciiva.com/30082/eng-cs-82066-mod-jacks-and-mrj21-prod-single-1107-30082071.pdf?src-supplier=Onlinecomponents.com; ComponentLink5URL: https://datasheet.ciiva.com/16650/eng-cs-82066-mod-jacks-and-mrj21-prod-single-1107-16650297.pdf?src-supplier=Avnet+Europe; ComponentLink5Description: https://datasheet.ciiva.com/16650/eng-cs-82066-mod-jacks-and-mrj21-prod-single-1107-16650297.pdf?src-supplier=Avnet+Europe; ComponentLink6URL: https://datasheet.ciiva.com/8007/492544-8007818.pdf?src-supplier=Element14; ComponentLink6Description: https://datasheet.ciiva.com/8007/492544-8007818.pdf?src-supplier=Element14; ComponentLink7URL: https://datasheet.ciiva.com/3138/eng-cs-82066-mod-jacks-and-mrj21-prod-single-1107-3138668.pdf?src-supplier=Avnet; ComponentLink7Description: https://datasheet.ciiva.com/3138/eng-cs-82066-mod-jacks-and-mrj21-prod-single-1107-3138668.pdf?src-supplier=Avnet; ComponentLink8URL: https://datasheet.ciiva.com/14619/70042945-14619165.pdf?src-supplier=Allied+Electronics; ComponentLink8Description: https://datasheet.ciiva.com/14619/70042945-14619165.pdf?src-supplier=Allied+Electronics; Supplier Part Number 1: A31414-ND; LCSC Part Number: C305968
footprint 5520425-2 (CONN MOD JACK 6P4C VERT UNSHLD)
pins: 1, 2, 3, 4, MH1, MH2

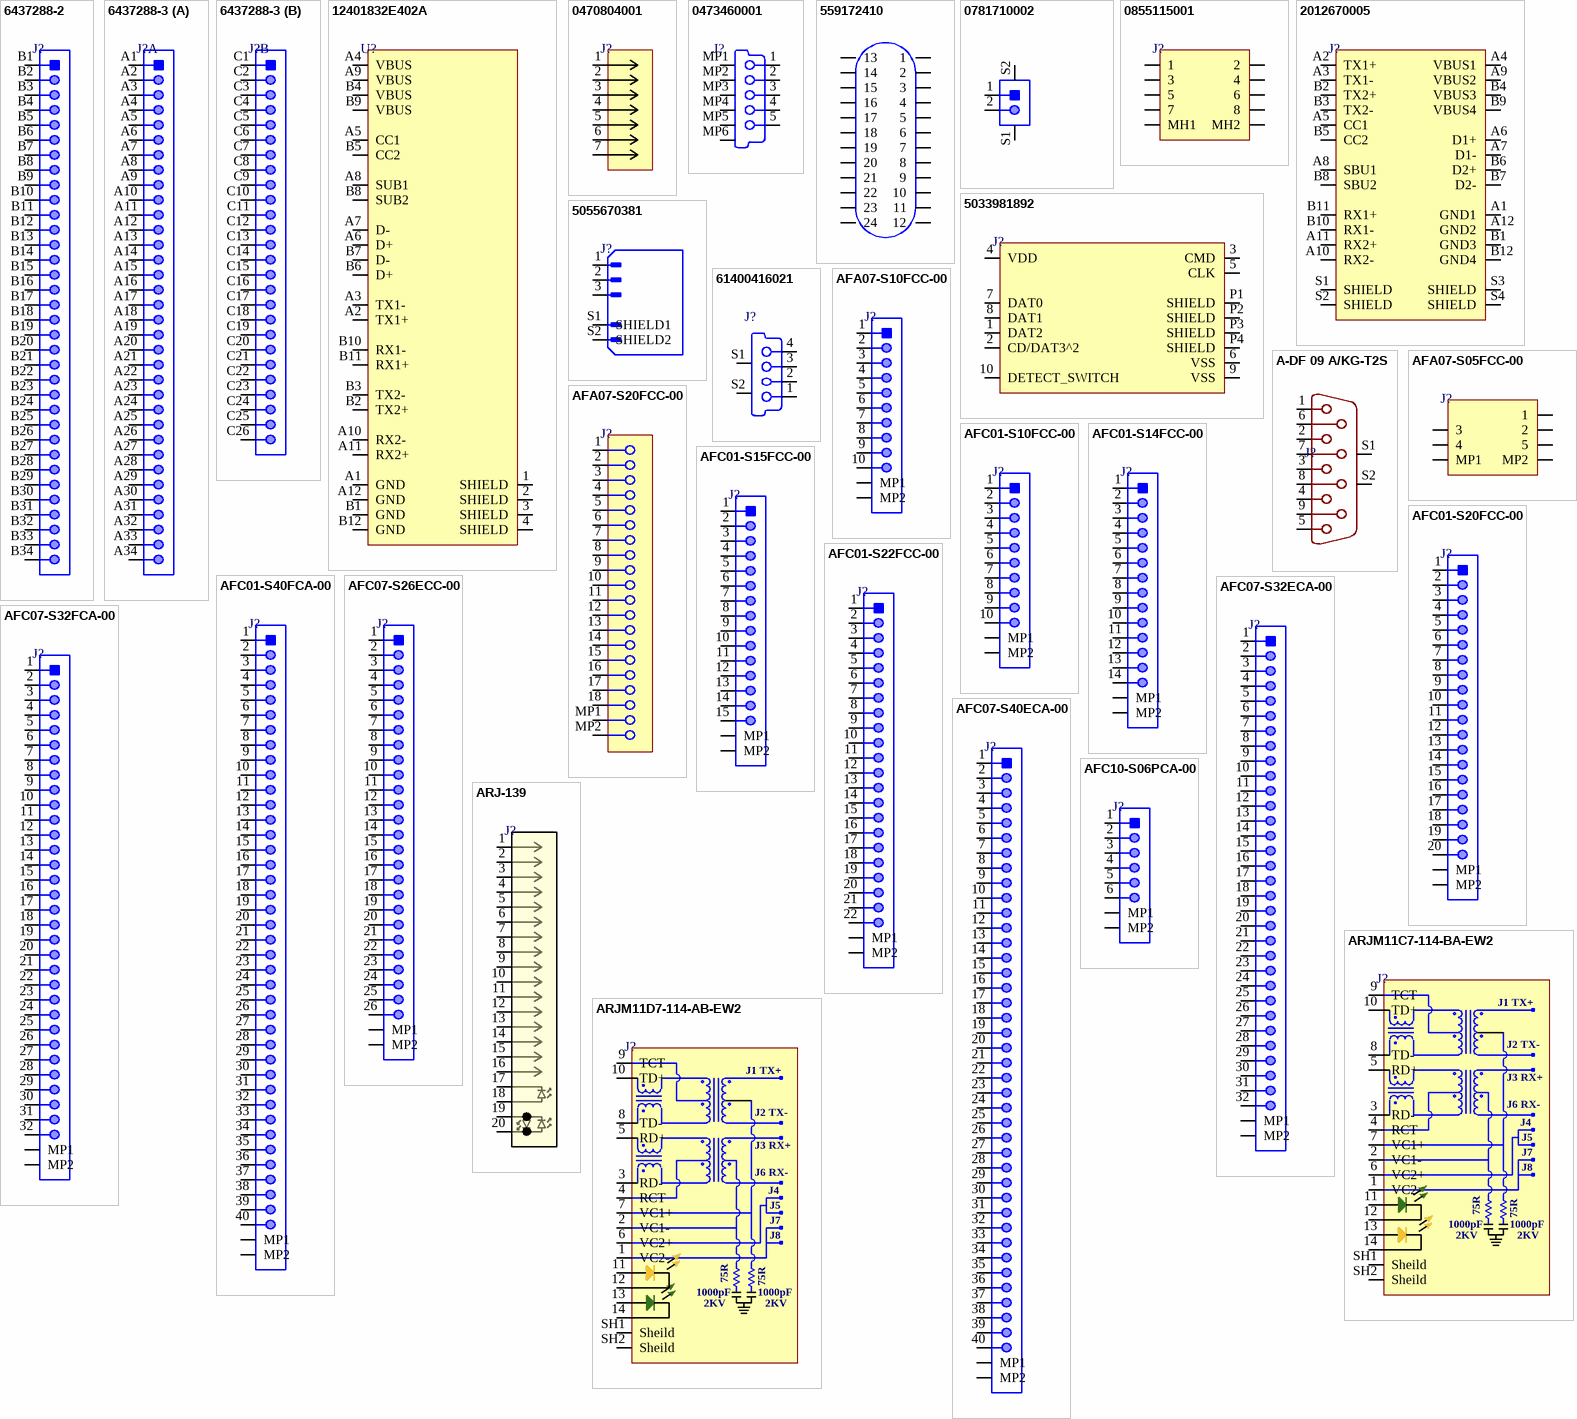
[diagram p1: symbols 6437288-2 to ARJM11D7-114-AB-EW2]

## 6437288-2
designator J?
CONN HEADER R/A 34POS 3MM; Manufacturer: TE Connectivity; Manufacturer Part Number: 6437288-2; Item Type: Connectors; Supplier: Avnet; Supplier Part Number: 69AH5934; RoHS: Yes; Stock: 15; Pricing: 1=21.65, 5=21.15, 10=20.79, 25=20.4, 50=19.97 (USD); ComponentLink1URL: https://datasheet.ciiva.com/11755/0900766b80f79e47-11755892.pdf?src-supplier=Rs; ComponentLink1Description: https://datasheet.ciiva.com/11755/0900766b80f79e47-11755892.pdf?src-supplier=Rs; ComponentLink2URL: https://datasheet.ciiva.com/9496/eng-cs-1308072-2-gad-lit-amp-superseal-0608-9496917.pdf?src-supplier=Avnet; ComponentLink2Description: https://datasheet.ciiva.com/9496/eng-cs-1308072-2-gad-lit-amp-superseal-0608-9496917.pdf?src-supplier=Avnet
footprint 6437288-2
pins: B1, B2, B3, B4, B5, B6, B7, B8, B9, B10, B11, B12, B13, B14, B15, B16, B17, B18, B19, B20, B21, B22, B23, B24, B25, B26, B27, B28, B29, B30, B31, B32, B33, B34

## 6437288-3
designator J?
CONN HEADER R/A 60POS 3MM; Manufacturer: TE Connectivity; Manufacturer Part Number: 6437288-3; Item Type: Connector; Supplier 1: Digikey; RoHS: Yes; Category: Headers and Wire Housings; Stock 1: 2119; Pricing 1: 1=23.56, 16=19.44938, 104=16.70635, 504=15.95829 (USD); ComponentLink1URL: https://datasheet.ciiva.com/11742/0900766b80fa0058-11742813.pdf?src-supplier=Rs; ComponentLink1Description: https://datasheet.ciiva.com/11742/0900766b80fa0058-11742813.pdf?src-supplier=Rs; ComponentLink2URL: https://datasheet.ciiva.com/31837/18928ddetrolleractionshowdocdocidcatalogsection7f1308072-2-gad-lit-31837713.pdf?src-supplier=Onlinecomponents.com; ComponentLink2Description: https://datasheet.ciiva.com/31837/18928ddetrolleractionshowdocdocidcatalogsection7f1308072-2-gad-lit-31837713.pdf?src-supplier=Onlinecomponents.com; ComponentLink3URL: https://datasheet.ciiva.com/9491/eng-cs-1308072-2-gad-lit-amp-superseal-0608-9491339.pdf?src-supplier=Avnet; ComponentLink3Description: https://datasheet.ciiva.com/9491/eng-cs-1308072-2-gad-lit-amp-superseal-0608-9491339.pdf?src-supplier=Avnet; Supplier Part Number 1: A122211-ND
footprint 6437288-3
part A pins: A1, A2, A3, A4, A5, A6, A7, A8, A9, A10, A11, A12, A13, A14, A15, A16, A17, A18, A19, A20, A21, A22, A23, A24, A25, A26, A27, A28, A29, A30, A31, A32, A33, A34
part B pins: C1, C2, C3, C4, C5, C6, C7, C8, C9, C10, C11, C12, C13, C14, C15, C16, C17, C18, C19, C20, C21, C22, C23, C24, C25, C26

## 12401832E402A
designator U?
CONN RCP USB3.1 TYPEC 24P SMD RA; Manufacturer: Amphenol; Manufacturer Part Number: 12401832E402A; Item Type: USB Connectors; Supplier: Avnet; LCSC Part Number: C464604; RoHS: No; Stock: 6472; Pricing: 1=1.33, 25=1.17, 100=1.04, 250=1.01, 500=0.976 (USD); ComponentLink1URL: https://media.digikey.com/pdf/Data%20Sheets/Amphenol%20PDFs/12401832E402A_Dwg_RevX1_04-25-17.pdf?src-supplier=Digikey; ComponentLink1Description: https://media.digikey.com/pdf/Data%20Sheets/Amphenol%20PDFs/12401832E402A_Dwg_RevX1_04-25-17.pdf?src-supplier=Digikey
footprint 12401832E402A
pins: 1 SHIELD, 2 SHIELD, 3 SHIELD, 4 SHIELD, A1 GND, A2 TX1+, A3 TX1-, A4 VBUS, A5 CC1, A6 D+, A7 D-, A8 SUB1, A9 VBUS, A10 RX2-, A11 RX2+, A12 GND, B1 GND, B2 TX2+, B3 TX2-, B4 VBUS, B5 CC2, B6 D+, B7 D-, B8 SUB2, B9 VBUS, B10 RX1-, B11 RX1+, B12 GND

## 0470804001
designator J?
CONN SATA PLUG 7POS SLD R/A SMD; Manufacturer: Molex; Manufacturer Part Number: 0470804001; Supplier: Digikey; Supplier Part Number: WM4279DKR-ND; RoHS: Yes; Pricing: 1=0.94, 10=0.777, 100=0.6475 (USD); ComponentLink1URL: https://datasheet.ciiva.com/689/470804001-sd-689604.pdf?src-supplier=Digikey; ComponentLink1Description: https://datasheet.ciiva.com/689/470804001-sd-689604.pdf?src-supplier=Digikey; ComponentLink2URL: https://datasheet.ciiva.com/689/470804001-sd-689606.pdf?src-supplier=Digikey; ComponentLink2Description: https://datasheet.ciiva.com/689/470804001-sd-689606.pdf?src-supplier=Digikey; Item Type: SATA Plug
footprint 0470804001
pins: 1, 2, 3, 4, 5, 6, 7

## 0473460001
designator J?
Micro-USB B Receptacle with Flange, Bottom Mount, Surface Mount, Lead-Free; Manufacturer: Molex; Manufacturer Part Number: 47346-0001; Item Type: USB B Connector; Supplier 1: Digi-Key; RoHS: Yes; Category: Headers and Wire Housings; Stock 1: 9395; Pricing 1: 1=1.10000, 10=0.91200, 100=0.75980, 1000=0.60782 (USD); ComponentLink1URL: https://datasheet.ciiva.com/30075/304740473460001-io-nectors-30075527.pdf?src-supplier=Onlinecomponents.com; ComponentLink1Description: https://datasheet.ciiva.com/30075/304740473460001-io-nectors-30075527.pdf?src-supplier=Onlinecomponents.com; ComponentLink2URL: https://datasheet.ciiva.com/22654/1630785-22654942.pdf?src-supplier=Element14; ComponentLink2Description: https://datasheet.ciiva.com/22654/1630785-22654942.pdf?src-supplier=Element14; ComponentLink3URL: https://datasheet.ciiva.com/16148/1700180473460001-io-nectors-16148917.pdf?src-supplier=Onlinecomponents.com; ComponentLink3Description: https://datasheet.ciiva.com/16148/1700180473460001-io-nectors-16148917.pdf?src-supplier=Onlinecomponents.com; ComponentLink4URL: https://datasheet.ciiva.com/11731/0900766b80dfe0a7-11731298.pdf?src-supplier=RSComponents; ComponentLink4Description: https://datasheet.ciiva.com/11731/0900766b80dfe0a7-11731298.pdf?src-supplier=RSComponents; ComponentLink5URL: https://datasheet.ciiva.com/1098/1698067-1098476.pdf?src-supplier=Element14; ComponentLink5Description: https://datasheet.ciiva.com/1098/1698067-1098476.pdf?src-supplier=Element14; ComponentLink6URL: https://datasheet.ciiva.com/4598/0473460001-io-connectors-146446-4598841.pdf?src-supplier=Mouser; ComponentLink6Description: https://datasheet.ciiva.com/4598/0473460001-io-connectors-146446-4598841.pdf?src-supplier=Mouser; ComponentLink7URL: https://datasheet.ciiva.com/28504/0473460001-io-connectors-28504587.pdf?src-supplier=Element14; ComponentLink7Description: https://datasheet.ciiva.com/28504/0473460001-io-connectors-28504587.pdf?src-supplier=Element14; ComponentLink8URL: https://datasheet.ciiva.com/46390/1681853-46390956.pdf?src-supplier=Element14; ComponentLink8Description: https://datasheet.ciiva.com/46390/1681853-46390956.pdf?src-supplier=Element14; ComponentLink9URL: https://datasheet.ciiva.com/16986/70266948-16986683.pdf?src-supplier=Allied+Electronics; ComponentLink9Description: https://datasheet.ciiva.com/16986/70266948-16986683.pdf?src-supplier=Allied+Electronics; Supplier Part Number 1: WM17141DKR-ND
footprint 0473460001_
pins: 1 V BUS (5V) "USB Vcc [Red]", 2 D- "USB Data - [White]", 3 D+ "USB Data + [Green]", 4 ID "Not Connected (or joined to pin 5 via resistor)", 5 GND "Ground [Black]", MP1 Tab "Shell", MP2 Tab "Shell", MP3 Tab "Shell", MP4 Tab "Shell", MP5 Tab "Shell", MP6 Tab "Shell"

## 559172410
designator J?
Headers & Wire Housings 24 Ckt Vert. Header; Manufacturer: MOLEX; Symbol: 559172410; Add into BOM: yes; Pins Structure: 2x12P; Pitch: 2mm; Number of PINs Per Row: 12; Row Spacing: 5mm; Item Type: Wire To Board Connector; Device: 559172410; Supplier: LCSC; LCSC Part Number: C293637; Manufacturer Part: 559172410; JLCPCB Part Class: Extended Part; LCSC Part Name: 559172410; Supplier Footprint: 插件,P=2mm; Datasheet: https://atta.szlcsc.com/upload/public/pdf/source/20181030/C293637_7B54371295420646723B707879F8A8AA.pdf; Convert to PCB: yes; Mounting Style: -; Reference Series: -; Number of Pins: 24P; Number of Rows: 2; Contact Material: Brass
footprint 559172410
pins: 1, 2, 3, 4, 5, 6, 7, 8, 9, 10, 11, 12, 13, 14, 15, 16, 17, 18, 19, 20, 21, 22, 23, 24

## 0781710002
designator J?
CONN HEADER SMD 2POS 1.2MM; Manufacturer: Molex; Manufacturer Part Number: 0781710002; Item Type: To Board / Wire To Wire Connector; Contact Resistance: 20mR; Max Voltage Rating (AC): 50V; Number of Contacts: 2; Package: Custom; LCSC Part Number: C505023; ComponentLink1Description: LCSC; ComponentLink1URL: https://www.lcsc.com/product-detail/Wire-To-Board-Wire-To-Wire-Connector_MOLEX-781710002_C505023.html; Supplier: Mouser; Supplier Part Number: 538-78171-0002; RoHS: Yes; Stock: 82070; Pricing: 1=0.39, 10=0.313, 50=0.313, 100=0.228, 1000=0.181, 10000=0.141 (USD); Housing Material: Polymer; Contact Plating: Gold; Contact Material: Copper Alloy; Housing Color: Black; Min Operating Temperature: -25°C; Max Operating Temperature: 85°C; Number of Rows: 1; Packaging: Tape and Reel; Orientation: Straight; Termination: Solder; Length: 4.2mm; Pitch: 1.2mm; Depth: 4.5mm; Radiation Hardening: No; RoHS Compliant: Yes
footprint 0781710002
pins: 1, 2, S1, S2

## 0855115001
designator J?
CONN MOD JACK 8P8C VERT UNSHLD; Manufacturer: Molex; Manufacturer Part Number: 85511-5001; Number of Ports: 1; Gender: Female; Current Rating: 1.5A; Shielding: Unshielded; Voltage Rating: 125V; Number of Contacts: 8; Connector Type: PCB; Pitch: 2.54mm; Item Type: Ethernet Connector; Supplier 1: Mouser; RoHS: Yes; Category: Modular / Ethernet Connectors; Stock 1: 2609; Pricing 1: 1=2.18, 10=1.62, 50=1.62, 100=1.56, 1000=1.37, 10000=1.36 (USD); Mounting Technology: Through Hole; Contact Plating: Gold; Contact Material: Bronze; Housing Material: Thermoplastic; Min Operating Temperature: -40°C; Max Operating Temperature: 80°C; Packaging: Tray; Orientation: Straight; Package Quantity: 2618; Termination: Through Hole; Number of Positions: 8; Series: 85511; Radiation Hardening: No; RoHS Compliant: Yes; Reach SVHC Compliant: Unknown; ComponentLink1URL: https://datasheet.ciiva.com/8042/1598510-8042692.pdf?src-supplier=Element14; ComponentLink1Description: https://datasheet.ciiva.com/8042/1598510-8042692.pdf?src-supplier=Element14; ComponentLink2URL: https://datasheet.ciiva.com/34305/0855115001-modular-jacks-plug-34305578.pdf?src-supplier=Onlinecomponents.com; ComponentLink2Description: https://datasheet.ciiva.com/34305/0855115001-modular-jacks-plug-34305578.pdf?src-supplier=Onlinecomponents.com; ComponentLink3URL: https://datasheet.ciiva.com/4562/0855115001-modular-jacks-plug-175812-4562506.pdf?src-supplier=Mouser; ComponentLink3Description: https://datasheet.ciiva.com/4562/0855115001-modular-jacks-plug-175812-4562506.pdf?src-supplier=Mouser; ComponentLink4URL: https://datasheet.ciiva.com/9392/0855115001-modular-jacks-plug-9392966.pdf?src-supplier=Avnet; ComponentLink4Description: https://datasheet.ciiva.com/9392/0855115001-modular-jacks-plug-9392966.pdf?src-supplier=Avnet; Supplier Part Number 1: 538-85511-5001
footprint 0855115001
pins: 1, 2, 3, 4, 5, 6, 7, 8, MH1, MH2